# Altium footprint library Car_dirver.PcbLib: 21 footprints (part 1 of 2)
Each footprint in its own frame and in the unit in brackets; x right, y up, seen from the top. Pads: shape width x height; smd on the part's side, far side on the other; paste and mask are expansions set on the pad; w line width, h text height; cw(c..) or ccw(c..) is an arc to the next point about the centre after c.
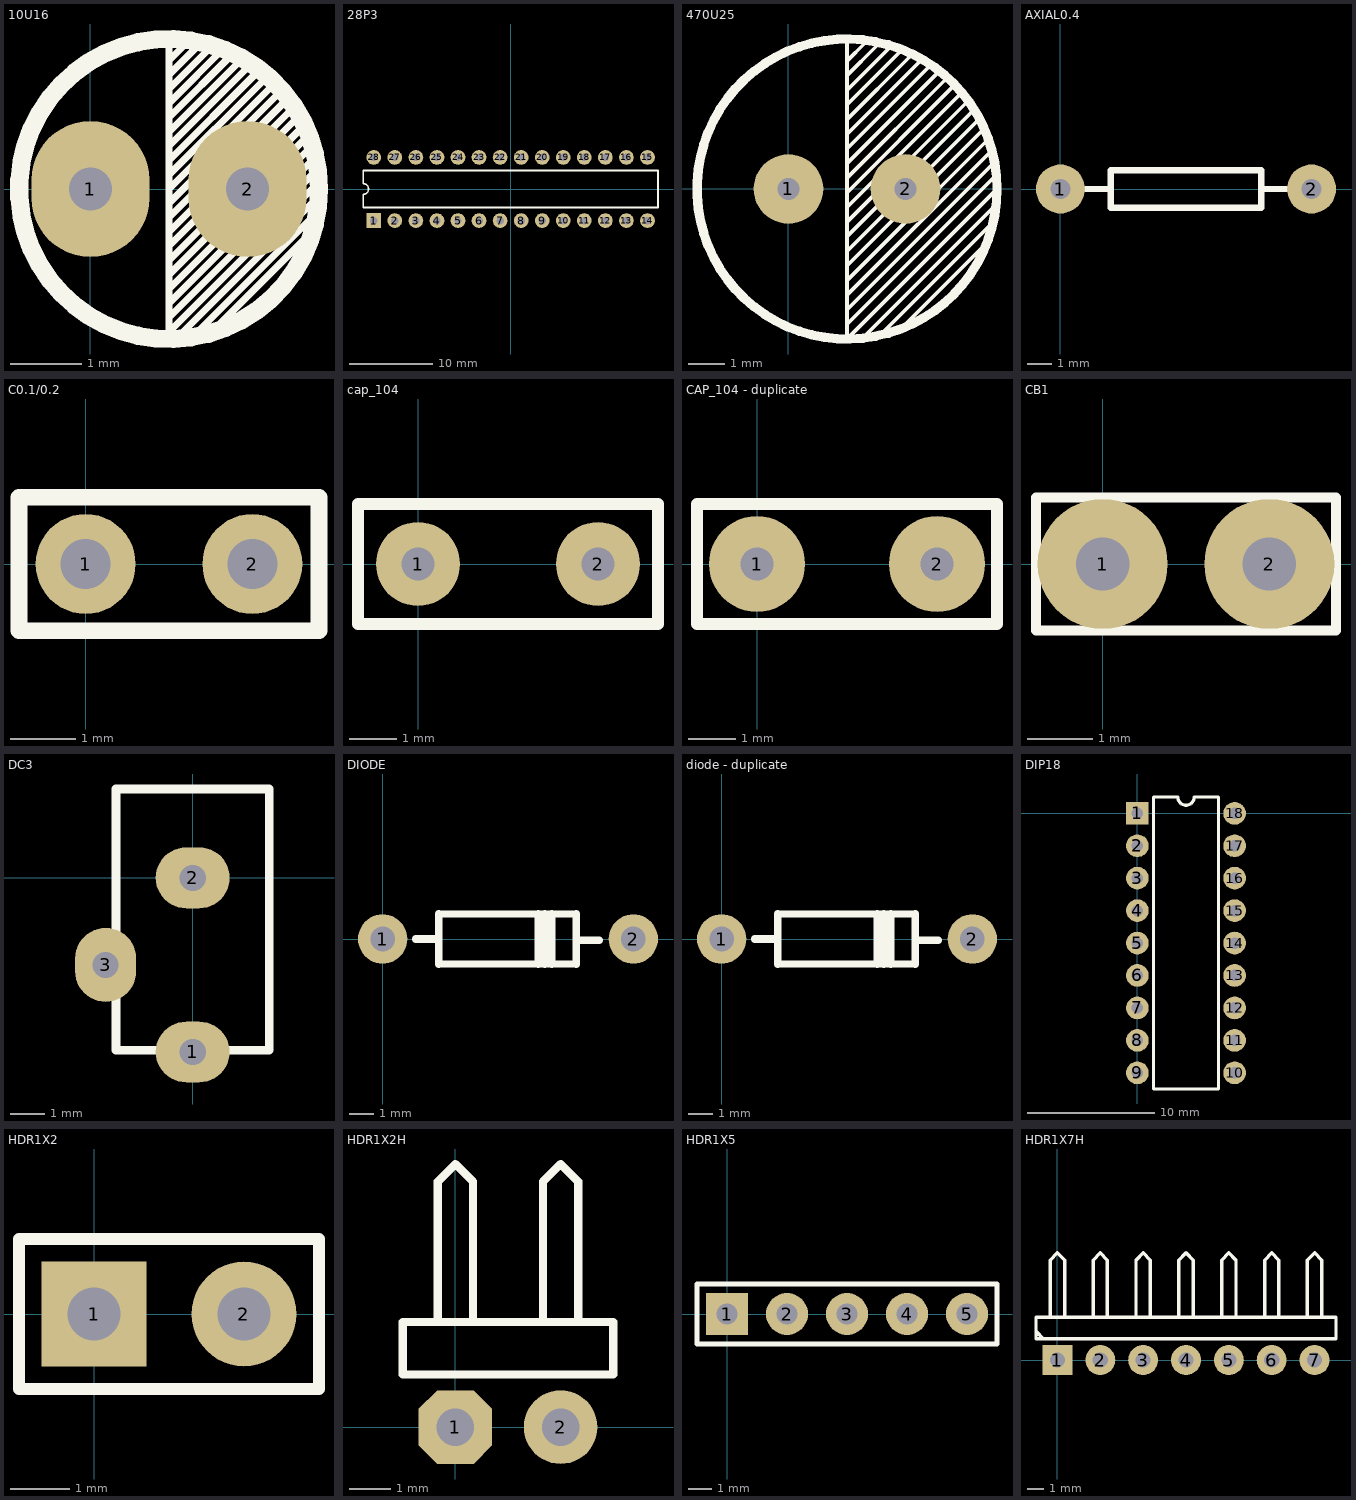
[diagram p0: the footprints below, top view; thin cyan lines are the x and y axes]

## 10U16 [mm]
height 10.2
pads (2):
  oval 1.651x1.905 hole 0.6: 1(0,0) 2(2.2,0)
Top Overlay:
  circle w0.254: c1.1,0 r2.1
  lines w0.1: 1.1,-2.1 1.1,2.1 ; 1.1,-2 3.2,0.1 ; 1.1,-1.8 3.1,0.2 ; 1.1,-1.6 3.1,0.4 ; 1.1,-1.4 3.1,0.6 ; 1.1,-1.2 3,0.7 ; 1.1,-1 3,0.9 ; 1.1,-0.8 2.9,1 ; 1.1,-0.6 2.8,1.1 ; 1.1,-0.4 2.7,1.2 ; 1.1,-0.2 2.6,1.3 ; 1.1,0 2.5,1.4 ; 1.1,0.2 2.4,1.5 ; 1.1,0.4 2.3,1.6 ; 1.1,0.6 2.2,1.7 ; 1.1,0.8 2.1,1.8 ; 1.1,1 2,1.9 ; 1.1,1.2 1.9,2 ; 1.1,1.4 1.7,2 ; 1.1,1.6 1.6,2.1 ; 1.1,1.8 1.4,2.1 ; 1.2,-2.1 3.2,-0.1 ; 1.4,-2.1 3.1,-0.4 ; 1.8,-1.9 3,-0.7

## 28P3 [mil] "DIP; 28 Leads; Row Spacing 7.62 mm; Pitch 2.54 mm"
height 180.31
pads (28):
  rect 70x70 hole 35.43 unplated: 1(-650,-150)
  round 70 hole 35.43 unplated: 2(-550,-150) 3(-450,-150) 4(-350,-150) 5(-250,-150) 6(-150,-150) 7(-50,-150) 8(50,-150) 9(150,-150) 10(250,-150) 11(350,-150) 12(450,-150) 13(550,-150) 14(650,-150) 15(650,150) 16(550,150) 17(450,150) 18(350,150) 19(250,150) 20(150,150) 21(50,150) 22(-50,150) 23(-150,150) 24(-250,150) 25(-350,150) 26(-450,150) 27(-550,150) 28(-650,150)
Top Overlay:
  lines w7.87: -700,-87.6 700,-87.6 700,87.6 -700,87.6 -700,25 cw(c-700,0) -700,-25 -700,-87.6

## 470U25 [mm]
height 10.2
pads (2):
  round 1.905 hole 0.6: 1(0,0) 2(3.2,0)
Top Overlay:
  circle w0.254: c1.6,0 r4.1
  lines w0.1: 1.6,-3.7 5.7,0.4 ; 1.6,-3.3 5.6,0.7 ; 1.6,-2.9 5.5,1 ; 1.6,-2.5 5.5,1.4 ; 1.6,-2.1 5.3,1.6 ; 1.6,-1.7 5.2,1.9 ; 1.6,-1.3 5,2.1 ; 1.6,-0.9 4.9,2.4 ; 1.6,-0.5 4.7,2.6 ; 1.6,-0.1 4.5,2.8 ; 1.6,0.3 4.3,3 ; 1.6,0.7 4.1,3.2 ; 1.6,1.1 3.9,3.4 ; 1.6,1.5 3.6,3.5 ; 1.6,1.9 3.3,3.6 ; 1.6,2.3 3.1,3.8 ; 1.6,2.7 2.8,3.9 ; 1.6,3.1 2.4,3.9 ; 1.6,3.5 2.1,4 ; 1.6,4 1.6,-4.1 5.7,0 ; 2,-4.1 5.7,-0.4 ; 2.5,-4 5.6,-0.9 ; 3.1,-3.8 5.3,-1.6

## AXIAL0.4 [mil]
height 401.57
pads (2):
  round 78 hole 32: 1(0,0) 2(400,0)
Top Overlay:
  lines w10: 40,0 80,0 ; 320,0 360,0 ; 80,-30 320,-30 320,30 80,30 80,-30

## C0.1/0.2 [mil]
height 401.57
pads (2):
  round 60 hole 30: 1(0,0) 2(100,0)
Top Overlay:
  lines w10: -40,-40 140,-40 140,40 -40,40 -40,-40

## cap_104 [mil]
height 401.57
pads (2):
  round 70 hole 27.56: 1(0,0) 2(150,0)
Top Overlay:
  lines w10: -50,-50 200,-50 200,50 -50,50 -50,-50

## CAP_104 - duplicate [mil]
pads (2):
  round 80 hole 27.56: 1(0,0) 2(150,0)
Top Overlay:
  lines w10: -50,-50 200,-50 200,50 -50,50 -50,-50

## CB1 [mil]
height 401.57
pads (2):
  round 78 hole 32: 1(0,0) 2(100,0)
Top Overlay:
  lines w6: -40,-40 -40,40 140,40 140,-40 -40,-40

## DC3 [mil]
pads (3):
  oval 85x70 hole 30 unplated: 1(0,-200) 2(0,0)
  oval 70x85 hole 30 unplated: 3(-100,-100)
Top Overlay:
  lines w10: -88,-198 88,-198 88,102 -88,102 -88,-198

## DIODE [mm]
height 10.2
pads (2):
  round 2 hole 1: 1(0,0) 2(10.16,0)
Top Overlay:
  lines w0.305: 1.35,0 2.282,0 ; 2.282,-1.016 2.282,1.016 ; 2.289,-1.007 7.841,-1.014 ; 2.289,1.007 7.841,1.014 ; 6.3,-1.016 6.3,1.016 ; 6.575,-1.016 6.575,1.016 ; 6.85,-1.016 6.85,1.016 ; 7.853,-1.016 7.853,1.016 ; 7.853,-0.05 8.785,-0.05

## diode - duplicate [mm]
pads (2):
  round 2 hole 1: 1(0,0) 2(10.16,0)
Top Overlay:
  lines w0.305: 1.35,0 2.282,0 ; 2.282,-1.016 2.282,1.016 ; 2.289,-1.007 7.841,-1.014 ; 2.289,1.007 7.841,1.014 ; 6.3,-1.016 6.3,1.016 ; 6.575,-1.016 6.575,1.016 ; 6.85,-1.016 6.85,1.016 ; 7.853,-1.016 7.853,1.016 ; 7.853,-0.05 8.785,-0.05

## DIP18 [mil]
height 401.57
pads (18):
  rect 70x70 hole 35.43 unplated: 1(0,0)
  round 70 hole 35.43 unplated: 2(0,-100) 3(0,-200) 4(0,-300) 5(0,-400) 6(0,-500) 7(0,-600) 8(0,-700) 9(0,-800) 10(300,-800) 11(300,-700) 12(300,-600) 13(300,-500) 14(300,-400) 15(300,-300) 16(300,-200) 17(300,-100) 18(300,0)
Top Overlay:
  lines w10: 50,-850 250,-850 250,50 175,50 cw(c150,50) 125,50 50,50 50,-850

## HDR1X2 [mil] "Connector; Header; 2 Position"
height 401.57
pads (2):
  rect 70x70 hole 35.43 unplated: 1(0,0)
  round 70 hole 35.43 unplated: 2(100,0)
Top Overlay:
  lines w7.87: -50,-50 150,-50 150,50 -50,50 -50,-50

## HDR1X2H [mil] "Connector; Header; 2 Position; Right Angle"
pads (2):
  oct 70x70 hole 35.43 unplated: 1(0,0)
  round 70 hole 35.43 unplated: 2(100,0)
Top Overlay:
  lines w7.87: -16.67,100 -16.67,233.33 0,250 16.67,233.33 16.67,100 ; 83.33,100 83.33,233.33 100,250 116.67,233.33 116.67,100 ; -50,50 150,50 150,100 -50,100 -50,50

## HDR1X5 [mil] "Connector; Header; 5 Position"
height 401.57
pads (5):
  rect 70x70 hole 35.43 unplated: 1(0,0)
  round 70 hole 35.43 unplated: 2(100,0) 3(200,0) 4(300,0) 5(400,0)
Top Overlay:
  lines w7.87: -50,-50 -50,50 450,50 450,-50 -50,-50

## HDR1X7H [mil] "Connector; Header; 7 Position; Right Angle"
pads (7):
  rect 70x70 hole 35.43 unplated: 1(0,0)
  round 70 hole 35.43 unplated: 2(100,0) 3(200,0) 4(300,0) 5(400,0) 6(500,0) 7(600,0)
Top Overlay:
  lines w7.87: -50,66.67 -33.33,50 ; -16.67,100 -16.67,233.33 0,250 16.67,233.33 16.67,100 ; 83.33,100 83.33,233.33 100,250 116.67,233.33 116.67,100 ; 183.33,100 183.33,233.33 200,250 216.67,233.33 216.67,100 ; 283.33,100 283.33,233.33 300,250 316.67,233.33 316.67,100 ; 383.33,100 383.33,233.33 400,250 416.67,233.33 416.67,100 ; 483.33,100 483.33,233.33 500,250 516.67,233.33 516.67,100 ; 583.33,100 583.33,233.33 600,250 616.67,233.33 616.67,100 ; -50,50 -50,100 650,100 650,50 -50,50